# Altium footprint library 12M10PIXT3241020.PcbLib: 1 footprints
Each footprint in its own frame and in the unit in brackets; x right, y up, seen from the top. Pads: shape width x height; smd on the part's side, far side on the other; paste and mask are expansions set on the pad; w line width, h text height; cw(c..) or ccw(c..) is an arc to the next point about the centre after c.
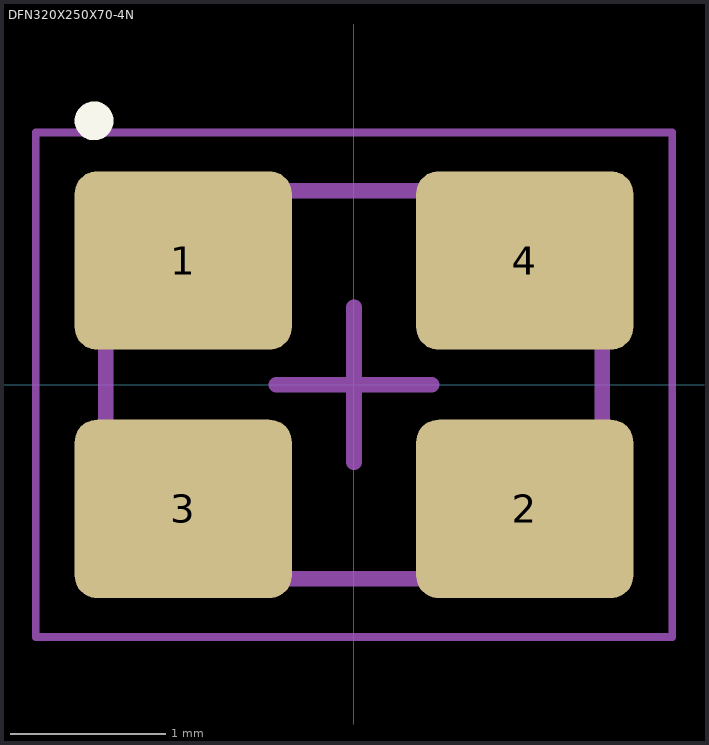
[diagram p0: the footprint, top view; thin cyan lines are the x and y axes]

## DFN320X250X70-4N [mm] "DFN, 4-Leads, Body 3.20x2.50mm, Pitch 2.10mm, IPC Medium Density"
height 0.7
pads (4):
  rrect25% 1.4x1.15 smd: 1(-1.1,0.8) 2(1.1,-0.8) 3(-1.1,-0.8) 4(1.1,0.8)
Top Overlay:
  circle w0.125: c-1.675,1.7 r0.062
Top Assembly:
  circle w0.1: c-0.95,0.6 r0.25
  lines w0.1: -1.6,-1.25 1.6,-1.25 1.6,1.25 -1.6,1.25 -1.6,-1.25
Top Designator:
  text ".Designator" at 0,0.188 h1
Top Courtyard:
  lines w0.05: -2.05,-1.625 2.05,-1.625 2.05,1.625 -2.05,1.625 -2.05,-1.625
Top Component Center:
  lines w0.1: -0.5,0 0.5,0 ; 0,-0.5 0,0.5
3D body: height 0.7, standoff 0.1, extent -1.6,-1.25 1.6,1.25